# Altium schematic symbol library IC.SchLib: 22 symbols
Pins are listed as number, name and electrical type; pins without a type are passive.

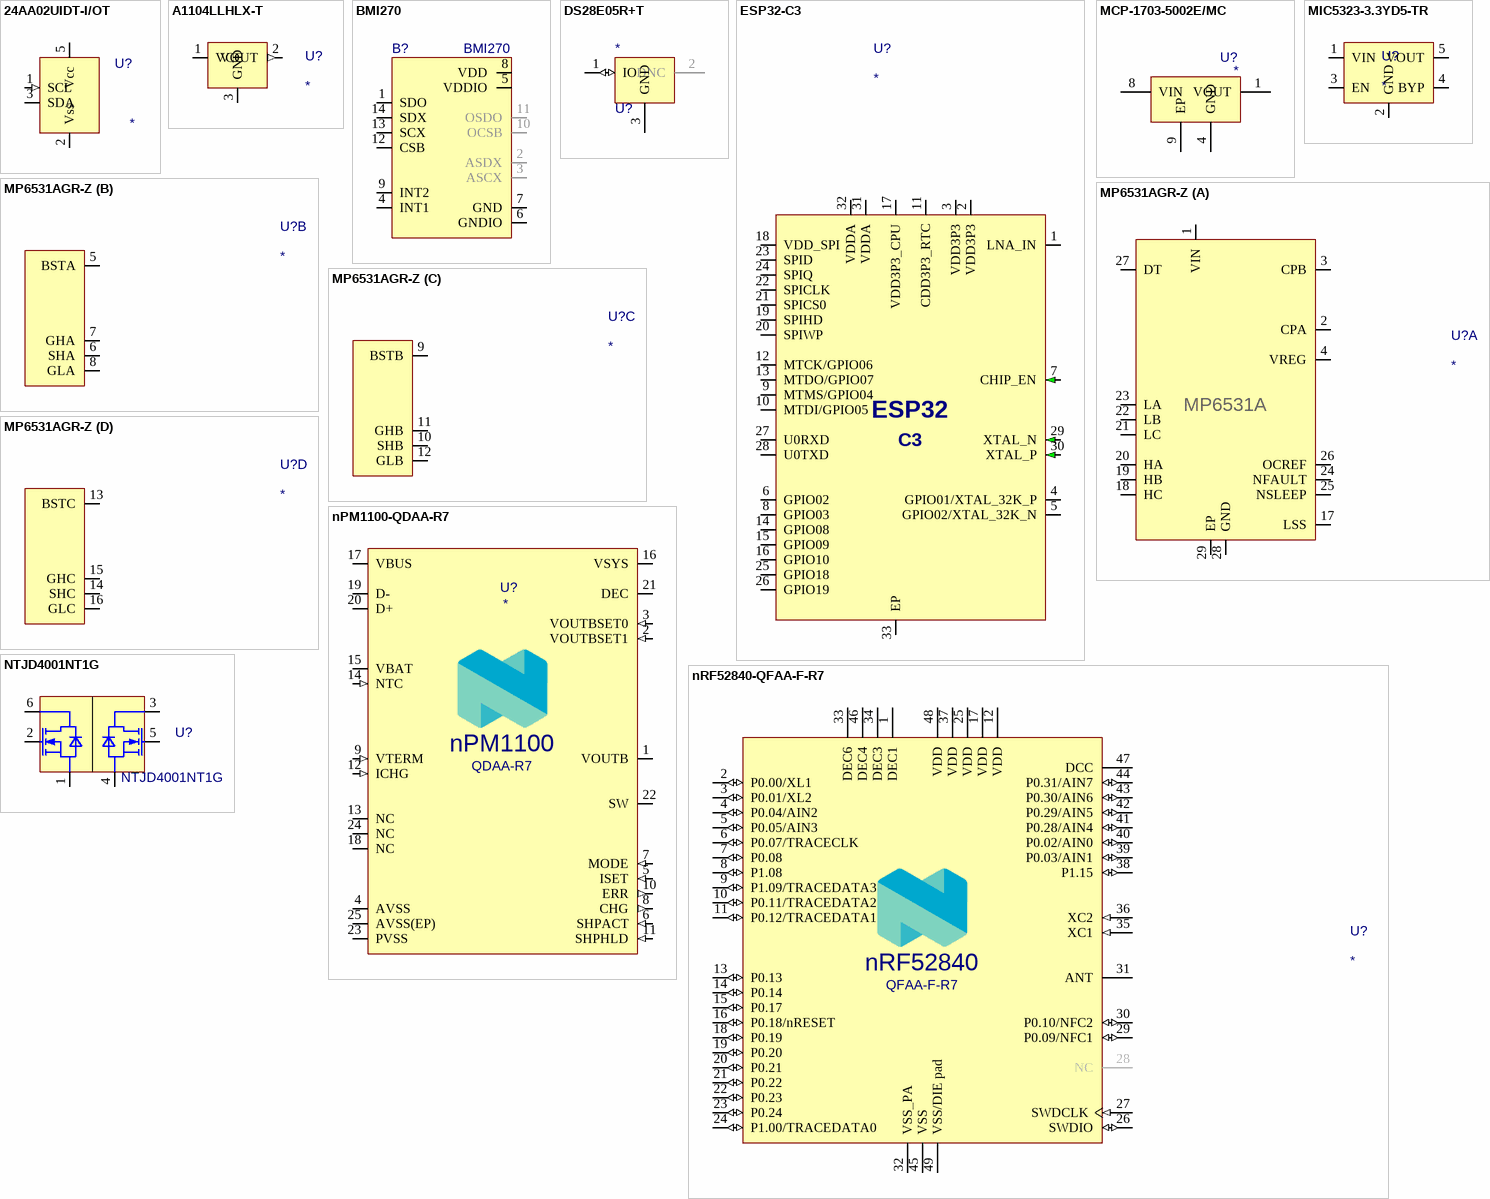
[diagram p0: symbols 24AA02UIDT-I/OT to NTJD4001NT1G]

## 24AA02UIDT-I/OT
designator U?
IC EEPROM 2KBIT I2C SOT23-5
footprint SPX3819M5-L-3-0/TR (LDO Voltage Regulators 500mA LOW NOISE LDO)
pins: 1 SCL (in), 2 Vss (power), 3 SDA (io), 5 Vcc (power)

## A1104LLHLX-T
designator U?
Digital Switch Unipolar Switch Open Drain Hall Effect SOT-23W
footprint SOT-23W (Package LH, 3-Pin, 3mm x 2.9mm, slightly smaller box size (pads 0.1mm smaller in length))
pins: 1 VCC (power), 2 VOUT (out), 3 GND (power)

## BMI270
designator B?
IMUs - Inertial Measurement Units Smart Ultra-Low Power Inertial Measurement Unit (IMU) for Wearable Applications; Manufacturer_Name: BOSCH; Geometry.Height: 0.87mm; Mouser Part Number: 262-BMI270; Mouser Price/Stock: https://www.mouser.co.uk/ProductDetail/Bosch-Sensortec/BMI270?qs=u16ybLDytRYIj%252BjQEee88A%3D%3D; Manufacturer_Part_Number: BMI270; Datasheet Link: https://www.bosch-sensortec.com/media/boschsensortec/downloads/datasheets/bst-bmi270-ds000.pdf
footprint BMI270
pins: 1 SDO, 2 ASDX, 3 ASCX, 4 INT1, 5 VDDIO, 6 GNDIO, 7 GND, 8 VDD, 9 INT2, 10 OCSB, 11 OSDO, 12 CSB, 13 SCX, 14 SDX

## DS28E05R+T
designator U?
EEPROM 1-Wire 112-BYTE EEPROM, SOT23 T&R; ComponentLink1Description: Datasheet; ComponentLink1URL: https://eu.mouser.com/datasheet/2/609/DS28E05-3468140.pdf; ComponentLink2Description: Product Detail; ComponentLink2URL: https://eu.mouser.com/ProductDetail/Analog-Devices-Maxim-Integrated/DS28E05R%2bT?qs=FoGyQ%2FpCy0g%252BVkc25tOVnQ%3D%3D; Supplier 1: Mouser; Supplier Part Number 1: 700-DS28E05R+T
footprint DS28E05R+T (EEPROM 1-Wire 112-BYTE EEPROM, SOT23 T&R)
pins: 1 IO (io), 2 DNC, 3 GND

## ESP32-C3
designator U?
RF System on a Chip - SoC SMD IC ESP32-C3, single-core MCU, 2.4G Wi-Fi & BLE 5.0 combo, QFN 32-pin, 5mm * 5mm; Supplier 1: Digikey; Supplier Part Number 1: 1904-ESP32-C3CT-ND
footprint ESP32-C3-IPC (QFN, 32-Leads, Body 5,00x5,00mm, Pitch 0,50mm, Thermal Pad 3,70x3,70mm, IPC Medium Density)
pins: 1 LNA_IN (io), 2 VDD3P3, 3 VDD3P3, 4 GPIO01/XTAL_32K_P (io), 5 GPIO02/XTAL_32K_N (io), 6 GPIO02 (io), 7 CHIP_EN, 8 GPIO03 (io), 9 MTMS/GPIO04 (io), 10 MTDI/GPIO05 (io), 11 CDD3P3_RTC, 12 MTCK/GPIO06 (io), 13 MTDO/GPIO07 (io), 14 GPIO08 (io), 15 GPIO09 (io), 16 GPIO10 (io), 17 VDD3P3_CPU, 18 VDD_SPI, 19 SPIHD (io), 20 SPIWP (io), 21 SPICS0 (io), 22 SPICLK (io), 23 SPID (io), 24 SPIQ (io), 25 GPIO18 (io), 26 GPIO19 (io), 27 U0RXD (io), 28 U0TXD (io), 29 XTAL_N, 30 XTAL_P, 31 VDDA, 32 VDDA, 33 EP
text: ESP32; C3

## MCP-1703-5002E/MC
designator U?
2x3 DFN-8. 250mA. 16V max. / Design note: Missing pins (2-3,5-7) are NC!; ComponentLink1Description: Datasheet @mouser; ComponentLink1URL: https://www.mouser.de/datasheet/2/268/MCP1703_250_mA_16V_Low_Quiescent_Current_LDO_20002-3032316.pdf
footprint MCP-1703-5002E/MC (2x3 DFN-8. 250mA. 16V max. / Design notes: / - Thermal relief vias in pad 9 (EP) are advised! / - Pins 2-3 and 5-7 are NC!)
pins: 1 VOUT, 4 GND, 8 VIN, 9 EP

## MIC5323-3.3YD5-TR
designator U?
LDO Voltage Regulators 300mA uCap ULDO High PSRR Low Noise Regulator; Manufacturer_Name: Microchip Technology; Manufacturer_Part_Number: MIC5323-3.3YD5-TR; Datasheet Link: https://www.mouser.de/datasheet/3/282/1/MIC5323.pdf
footprint SPX3819M5-L-3-3/TR (LDO Voltage Regulators 500mA LOW NOISE LDO)
pins: 1 VIN, 2 GND, 3 EN, 4 BYP, 5 VOUT

## MP6531AGR-Z
designator U?
Integrated Circuit; Manufacturer_Name: Monolithic Power Systems (MPS); Manufacturer_Part_Number: MP6531AGR-Z; Datasheet Link: https://www.monolithicpower.com/en/documentview/productdocument/index/version/2/document_type/Datasheet/lang/en/sku/MP6531A/document_id/1862/; Height: 1mm; Mouser Part Number: 946-MP6531AGR-Z; Mouser Price/Stock: https://www.mouser.co.uk/ProductDetail/Monolithic-Power-Systems-MPS/MP6531AGR-Z?qs=5aG0NVq1C4xl7PDY2hKmEA%3D%3D
footprint MP6531A-QFN40P400X400X100-29N (QFN40 for MP6531A)
part A pins: 1 VIN, 2 CPA, 3 CPB, 4 VREG, 17 LSS, 18 HC, 19 HB, 20 HA, 21 LC, 22 LB, 23 LA, 24 NFAULT, 25 NSLEEP, 26 OCREF, 27 DT, 28 GND, 29 EP
part B pins: 5 BSTA, 6 SHA, 7 GHA, 8 GLA
part C pins: 9 BSTB, 10 SHB, 11 GHB, 12 GLB
part D pins: 13 BSTC, 14 SHC, 15 GHC, 16 GLC
part A text: MP6531A

## nPM1100-QDAA-R7
designator U?
Battery Management Extremely compact Power Management IC (PMIC) QFN 4x4
footprint NPM1100-QDAA-R7 (Battery Management Extremely compact Power Management IC (PMIC) QFN)
pins: 1 VOUTB, 2 VOUTBSET1 (in), 3 VOUTBSET0 (in), 4 AVSS, 5 ISET (in), 6 SHPACT (in), 7 MODE (in), 8 CHG (out), 9 VTERM (in), 10 ERR (out), 11 SHPHLD (in), 12 ICHG (in), 13 NC, 14 NTC (in), 15 VBAT, 16 VSYS, 17 VBUS, 18 NC, 19 D- (io), 20 D+ (io), 21 DEC, 22 SW, 23 PVSS, 24 NC, 25 AVSS(EP)
text: nPM1100; QDAA-R7

## nRF52840-QFAA-F-R7
designator U?
Multiprotocol Bluetooth 5.4 SoC supporting Bluetooth Low Energy, Bluetooth mesh, NFC, Thread and Zigbee; ComponentLink1Description: Nordic nRF52840; ComponentLink1URL: https://www.nordicsemi.com/Products/nRF52840; ComponentLink2Description: Datasheet v1.10; ComponentLink2URL: https://docs-be.nordicsemi.com/bundle/ps_nrf52840/attach/nRF52840_PS_v1.10.pdf?_LANG=enus
footprint nRF52840-QFAA-F-R7 (RF System on a Chip - SoC Multiprotocol Bluetooth 5.3 SoC supporting Bluetooth Low Energy, Bluetooth mesh, NFC, Thread and Zigbee)
pins: 1 DEC1 "1.1V Digital supply decoupling", 2 P0.00/XL1 (io) "General purpose I/O; Connection for 32.768 kHz crystal", 3 P0.01/XL2 (io) "General purpose I/O; Connection for 32.768 kHz crystal", 4 P0.04/AIN2 (io) "General purpose I/O; Analog input", 5 P0.05/AIN3 (io) "General purpose I/O; Analog input", 6 P0.07/TRACECLK (io) "General purpose I/O; Trace buffer clock", 7 P0.08 (io) "General purpose I/O", 8 P1.08 (io) "General purpose I/O", 9 P1.09/TRACEDATA3 (io) "General purpose I/O; Trace buffer TRACEDATA[3]", 10 P0.11/TRACEDATA2 (io) "General purpose I/O; Trace buffer TRACEDATA[2]", 11 P0.12/TRACEDATA1 (io) "General purpose I/O; Trace buffer TRACEDATA[3]", 12 VDD (power) "Power supply", 13 P0.13 (io) "General purpose I/O", 14 P0.14 (io) "General purpose I/O", 15 P0.17 (io) "General purpose I/O", 16 P0.18/nRESET (io) "General purpose I/O; Configurable as pin RESET", 17 VDD "General purpose I/O", 18 P0.19 (io) "General purpose I/O", 19 P0.20 (io) "General purpose I/O", 20 P0.21 (io) "General purpose I/O", 21 P0.22 (io) "General purpose I/O", 22 P0.23 (io) "General purpose I/O", 23 P0.24 (io) "General purpose I/O", 24 P1.00/TRACEDATA0 (io) "General purpose I/O; Trace buffer TRACEDATA[0]; Serial wire output (SWO)", 25 VDD (power) "Power supply", 26 SWDIO (io) "Serial wire debug I/O for debug and programming", 27 SWDCLK (in) "Serial wire debug clock input for debug and programming", 28 NC "Not connected", 29 P0.09/NFC1 (io) "General purpose I/O; NFC antenna connection", 30 P0.10/NFC2 (io) "General purpose I/O; NFC antenna connection", 31 ANT "Single-ended radio antenna connection", 32 VSS_PA (power) "Ground (radio supply)", 33 DEC6 (power) "1.3V regulator supply decoupling - must be connected to DEC4", 34 DEC3 "Power supply, decoupling", 35 XC1 (in) "Connection for 32 MHz crystal", 36 XC2 (in) "Connection for 32 MHz crystal", 37 VDD (power) "Power supply", 38 P1.15 (io) "General purpose I/O", 39 P0.03/AIN1 (io) "General purpose I/O; Analog input", 40 P0.02/AIN0 (io) "General purpose I/O; Analog input", 41 P0.28/AIN4 (io) "General purpose I/O; Analog input", 42 P0.29/AIN5 (io) "General purpose I/O; Analog input", 43 P0.30/AIN6 (io) "General purpose I/O; Analog input", 44 P0.31/AIN7 (io) "General purpose I/O; Analog input", 45 VSS (power) "Ground", 46 DEC4 (power) "1.3V regulator supply decoupling - must be connected to DEC6", 47 DCC (power) "DC/DC converter output", 48 VDD (power) "Power supply", 49 VSS/DIE pad (power) "Ground pad - must be connected to ground (VSS) for proper device operation"
text: nRF52840; QFAA-F-R7

## NTJD4001NT1G
designator U?
MOSFETs 30V 250mA Dual N-Channel
footprint SOT363/SC-88 (6 LEADS)
pins: 1 S1, 2 G1, 3 D2, 4 S2, 5 G2, 6 D1

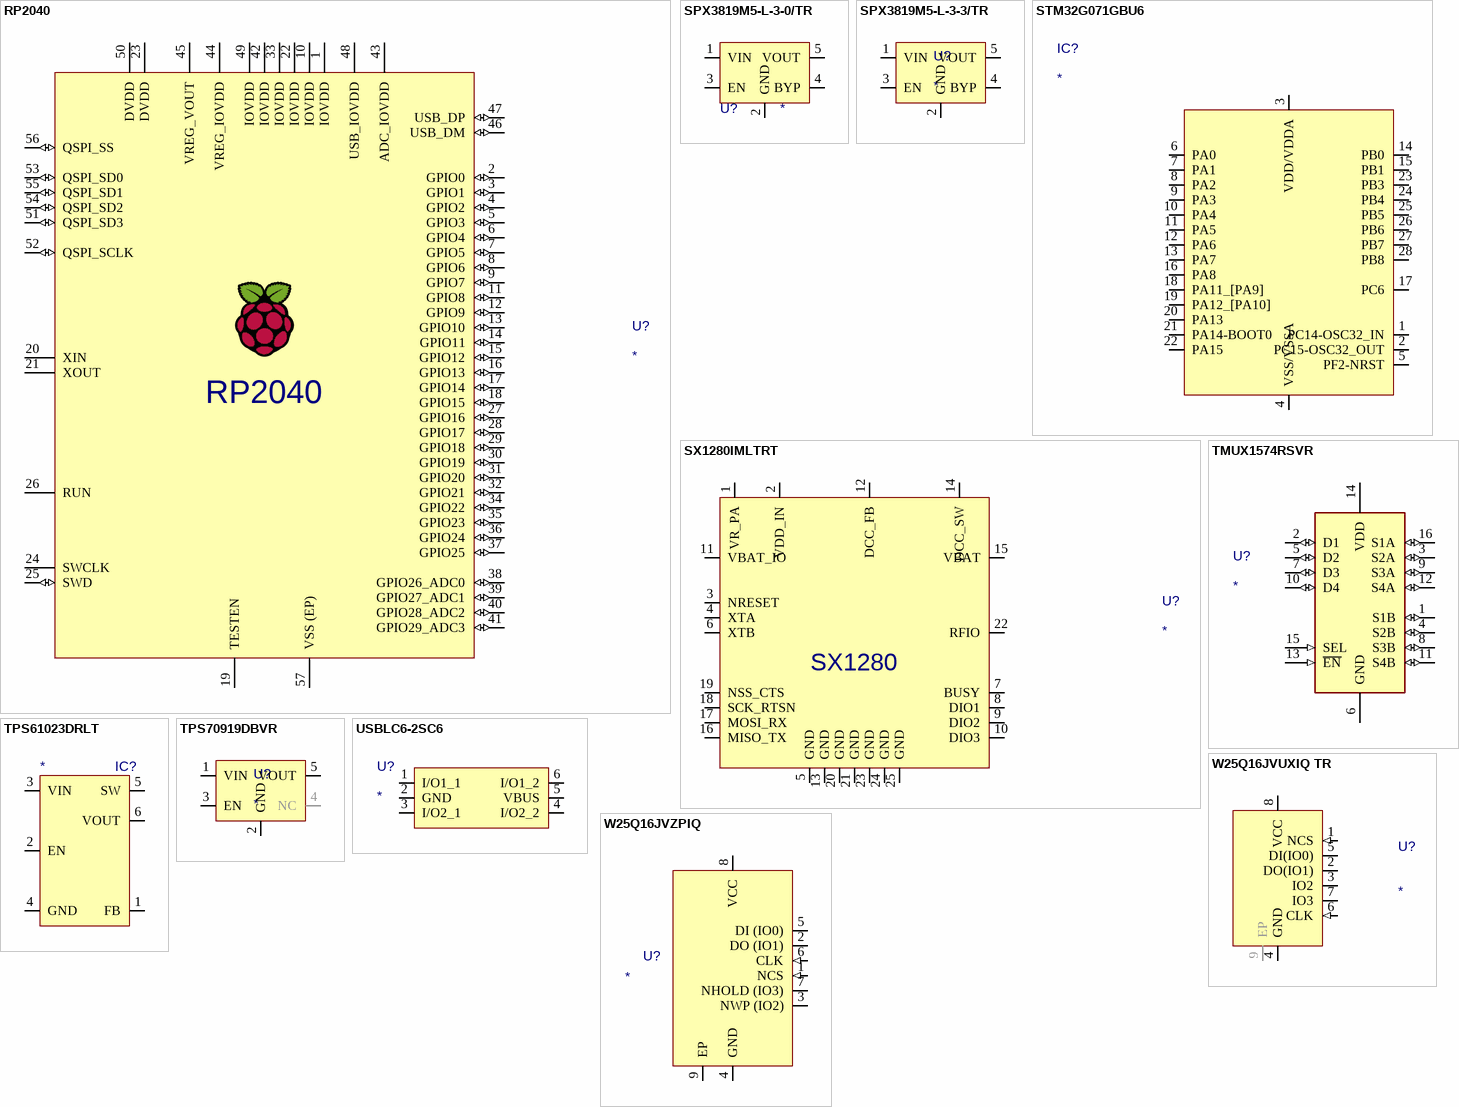
[diagram p1: symbols RP2040 to W25Q16JVZPIQ]

## RP2040
designator U?
SC0914(13) / ARM Microcontrollers - MCU IC RP2040 (RP2B2) T&R, 3,400 (13" reel) UICC01104
footprint QFN56 7x7 RP2040 (Recommended PCB / Footprint for the / RP2040 QFN-56 / package)
pins: 1 IOVDD (power), 2 GPIO0 (io), 3 GPIO1 (io), 4 GPIO2 (io), 5 GPIO3 (io), 6 GPIO4 (io), 7 GPIO5 (io), 8 GPIO6 (io), 9 GPIO7 (io), 10 IOVDD (power), 11 GPIO8 (io), 12 GPIO9 (io), 13 GPIO10 (io), 14 GPIO11 (io), 15 GPIO12 (io), 16 GPIO13 (io), 17 GPIO14 (io), 18 GPIO15 (io), 19 TESTEN (power), 20 XIN, 21 XOUT, 22 IOVDD (power), 23 DVDD (power), 24 SWCLK, 25 SWD (io), 26 RUN, 27 GPIO16 (io), 28 GPIO17 (io), 29 GPIO18 (io), 30 GPIO19 (io), 31 GPIO20 (io), 32 GPIO21 (io), 33 IOVDD (power), 34 GPIO22 (io), 35 GPIO23 (io), 36 GPIO24 (io), 37 GPIO25 (io), 38 GPIO26_ADC0 (io), 39 GPIO27_ADC1 (io), 40 GPIO28_ADC2 (io), 41 GPIO29_ADC3 (io), 42 IOVDD (power), 43 ADC_IOVDD (power), 44 VREG_IOVDD (power), 45 VREG_VOUT (power), 46 USB_DM (io), 47 USB_DP (io), 48 USB_IOVDD (power), 49 IOVDD (power), 50 DVDD (power), 51 QSPI_SD3 (io), 52 QSPI_SCLK (io), 53 QSPI_SD0 (io), 54 QSPI_SD2 (io), 55 QSPI_SD1 (io), 56 QSPI_SS (io), 57 VSS (EP) (power)

## SPX3819M5-L-3-0/TR
designator U?
LDO Voltage Regulators 500mA LOW NOISE LDO; ComponentLink1Description: Datasheet; ComponentLink1URL: https://eu.mouser.com/datasheet/2/146/SPX3819-1888965.pdf; ComponentLink2Description: Product Detail; ComponentLink2URL: https://eu.mouser.com/ProductDetail/MaxLinear/SPX3819M5-L-3-0-TR?qs=S%2FCBhQS5rCqWy9%252BGPrI6uw%3D%3D
footprint SPX3819M5-L-3-0/TR (LDO Voltage Regulators 500mA LOW NOISE LDO)
pins: 1 VIN, 2 GND, 3 EN, 4 BYP, 5 VOUT

## SPX3819M5-L-3-3/TR
designator U?
LDO Voltage Regulators 500mA LOW NOISE LDO
footprint SPX3819M5-L-3-3/TR (LDO Voltage Regulators 500mA LOW NOISE LDO)
pins: 1 VIN, 2 GND, 3 EN, 4 BYP, 5 VOUT

## STM32G071GBU6
designator IC?
Integrated Circuit; Manufacturer_Name: STMicroelectronics; Manufacturer_Part_Number: STM32G071GBU6; Datasheet Link: https://www.st.com/resource/en/datasheet/stm32g071c8.pdf; Height: 0.6mm; Mouser Part Number: 511-STM32G071GBU6; Mouser Price/Stock: https://www.mouser.co.uk/ProductDetail/STMicroelectronics/STM32G071GBU6?qs=PqoDHHvF64%2FgmAx6dD98Vg%3D%3D; Arrow Part Number: STM32G071GBU6; Arrow Price/Stock: https://www.arrow.com/en/products/stm32g071gbu6/stmicroelectronics?region=nac
footprint UFQFN28-STM32
pins: 1 PC14-OSC32_IN, 2 PC15-OSC32_OUT, 3 VDD/VDDA, 4 VSS/VSSA, 5 PF2-NRST, 6 PA0, 7 PA1, 8 PA2, 9 PA3, 10 PA4, 11 PA5, 12 PA6, 13 PA7, 14 PB0, 15 PB1, 16 PA8, 17 PC6, 18 PA11_[PA9], 19 PA12_[PA10], 20 PA13, 21 PA14-BOOT0, 22 PA15, 23 PB3, 24 PB4, 25 PB5, 26 PB6, 27 PB7, 28 PB8

## SX1280IMLTRT
designator U?
RF Transceiver Long range 2.4 GHz Wireless Transceiver
footprint SX1280IMLTRT (RF Transceiver Long range 2.4 GHz Wireless Transceiver)
pins: 1 VR_PA, 2 VDD_IN, 3 NRESET, 4 XTA, 5 GND, 6 XTB, 7 BUSY, 8 DIO1, 9 DIO2, 10 DIO3, 11 VBAT_IO, 12 DCC_FB, 13 GND, 14 DCC_SW, 15 VBAT, 16 MISO_TX, 17 MOSI_RX, 18 SCK_RTSN, 19 NSS_CTS, 20 GND, 21 GND, 22 RFIO, 23 GND, 24 GND, 25 GND
text: SX1280

## TMUX1574RSVR
designator U?
Analogue Switch ICs 5-V, 2:1 (SPDT), 4-channel analog switch with powered-off protection & 1.8-V input logic 16-UQFN -40 to 125; ComponentLink1Description: Datasheet; ComponentLink1URL: https://www.ti.com/lit/ds/symlink/tmux1574.pdf?ts=1730050577789&ref_url=https%253A%252F%252Fwww.ti.com%252Fproduct%252FTMUX1574; ComponentLink2Description: Product Detail; ComponentLink2URL: https://eu.mouser.com/ProductDetail/Texas-Instruments/TMUX1574RSVR?qs=byeeYqUIh0PCpchob7ea1A%3D%3D
footprint UQFN-16 (1.85x2.65)
pins: 1 S1B (io), 2 D1 (io), 3 S2A (io), 4 S2B (io), 5 D2 (io), 6 GND, 7 D3 (io), 8 S3B (io), 9 S3A (io), 10 D4 (io), 11 S4B (io), 12 S4A (io), 13 ~{EN} (in), 14 VDD (power), 15 SEL (in), 16 S1A (io)

## TPS61023DRLT
designator IC?
Switching Voltage Regulators 3.7-A boost converte r with 0.5-V ultra- A 595-TPS61023DRLR; Manufacturer_Name: Texas Instruments; Manufacturer_Part_Number: TPS61023DRLT; Datasheet Link: http://www.ti.com/general/docs/suppproductinfo.tsp?distId=10&gotoUrl=http%3A%2F%2Fwww.ti.com%2Flit%2Fgpn%2Ftps61023; Height: 0.6mm; Mouser Part Number: 595-TPS61023DRLT; Mouser Price/Stock: https://www.mouser.co.uk/ProductDetail/Texas-Instruments/TPS61023DRLT?qs=BJlw7L4Cy78Zr3IJIU3gNw%3D%3D; Arrow Part Number: TPS61023DRLT; Arrow Price/Stock: https://www.arrow.com/en/products/tps61023drlt/texas-instruments.html?utm_currency=USD&region=nac
footprint SOTFL50P160X60-6N
pins: 1 FB, 2 EN, 3 VIN, 4 GND, 5 SW, 6 VOUT

## TPS70919DBVR
designator U?
LDO Voltage Regulators 150-mA 30-V ultra- l ow-IQ low-dropout A A 595-TPS70919DBVT
footprint SPX3819M5-L-3-3/TR (LDO Voltage Regulators 500mA LOW NOISE LDO)
pins: 1 VIN, 2 GND, 3 EN, 4 NC, 5 VOUT

## USBLC6-2SC6
designator U?
ESD Protection Diodes / TVS Diodes ESD Protection Low Cap; Manufacturer_Name: STMicroelectronics; Manufacturer_Part_Number: USBLC6-2SC6; Datasheet Link: http://www.st.com/st-web-ui/static/active/en/resource/technical/document/datasheet/CD00050750.pdf; Height: 1.45mm; Mouser Part Number: 511-USBLC6-2SC6; Mouser Price/Stock: https://www.mouser.co.uk/ProductDetail/STMicroelectronics/USBLC6-2SC6?qs=po45yt2pPpu%2FhNIlwQdTlg%3D%3D; Arrow Part Number: USBLC6-2SC6; Arrow Price/Stock: https://www.arrow.com/en/products/usblc6-2sc6/stmicroelectronics?region=nac
footprint SOT95P280X145-6N
pins: 1 I/O1_1, 2 GND, 3 I/O2_1, 4 I/O2_2, 5 VBUS, 6 I/O1_2

## W25Q16JVUXIQ TR
designator U?
FLASH - NOR Memory IC 16Mbit SPI - Quad I/O 133 MHz 6 ns 8-USON (2x3)
footprint USON-8 - 2x3 (8-Lead Plastic Ultra Thin Small Outline No Lead Package (NP) - [2mm x 3mm]  Body [USON] / [Also called UDFN])
pins: 1 NCS (in), 2 DO(IO1) (io), 3 IO2 (io), 4 GND, 5 DI(IO0) (io), 6 CLK (in), 7 IO3 (io), 8 VCC, 9 EP

## W25Q16JVZPIQ
designator U?
NOR Flash spiFlash, 3V, 16M-bit, 4Kb Uniform Sector; Manufacturer_Name: Winbond; Manufacturer_Part_Number: W25Q16JVZPIQ; Datasheet Link: https://www.winbond.com/hq/search-resource-file.jsp?partNo=W25Q16JVZPIQ&type=datasheet; Height: 0.8mm; Mouser Part Number: 454-W25Q16JVZPIQ; Mouser Price/Stock: https://www.mouser.co.uk/ProductDetail/Winbond/W25Q16JVZPIQ?qs=qSfuJ%252Bfl%2Fd5j0dm6nxuK%252BA%3D%3D; Arrow Part Number: W25Q16JVZPIQ; Arrow Price/Stock: https://www.arrow.com/en/products/w25q16jvzpiq/winbond-electronics?region=nac
footprint W25Q16JVZPIQ (NOR Flash spiFlash, 3V, 16M-bit, 4Kb Uniform Sector)
pins: 1 NCS (in), 2 DO (IO1) (io), 3 NWP (IO2) (io), 4 GND, 5 DI (IO0) (io), 6 CLK (in), 7 NHOLD (IO3) (io), 8 VCC, 9 EP